# Altium footprint library ubloxLib.PcbLib: 65 footprints (part 4 of 5)
Each footprint in its own frame and in the unit in brackets; x right, y up, seen from the top. Pads: shape width x height; smd on the part's side, far side on the other; paste and mask are expansions set on the pad; w line width, h text height; cw(c..) or ccw(c..) is an arc to the next point about the centre after c.
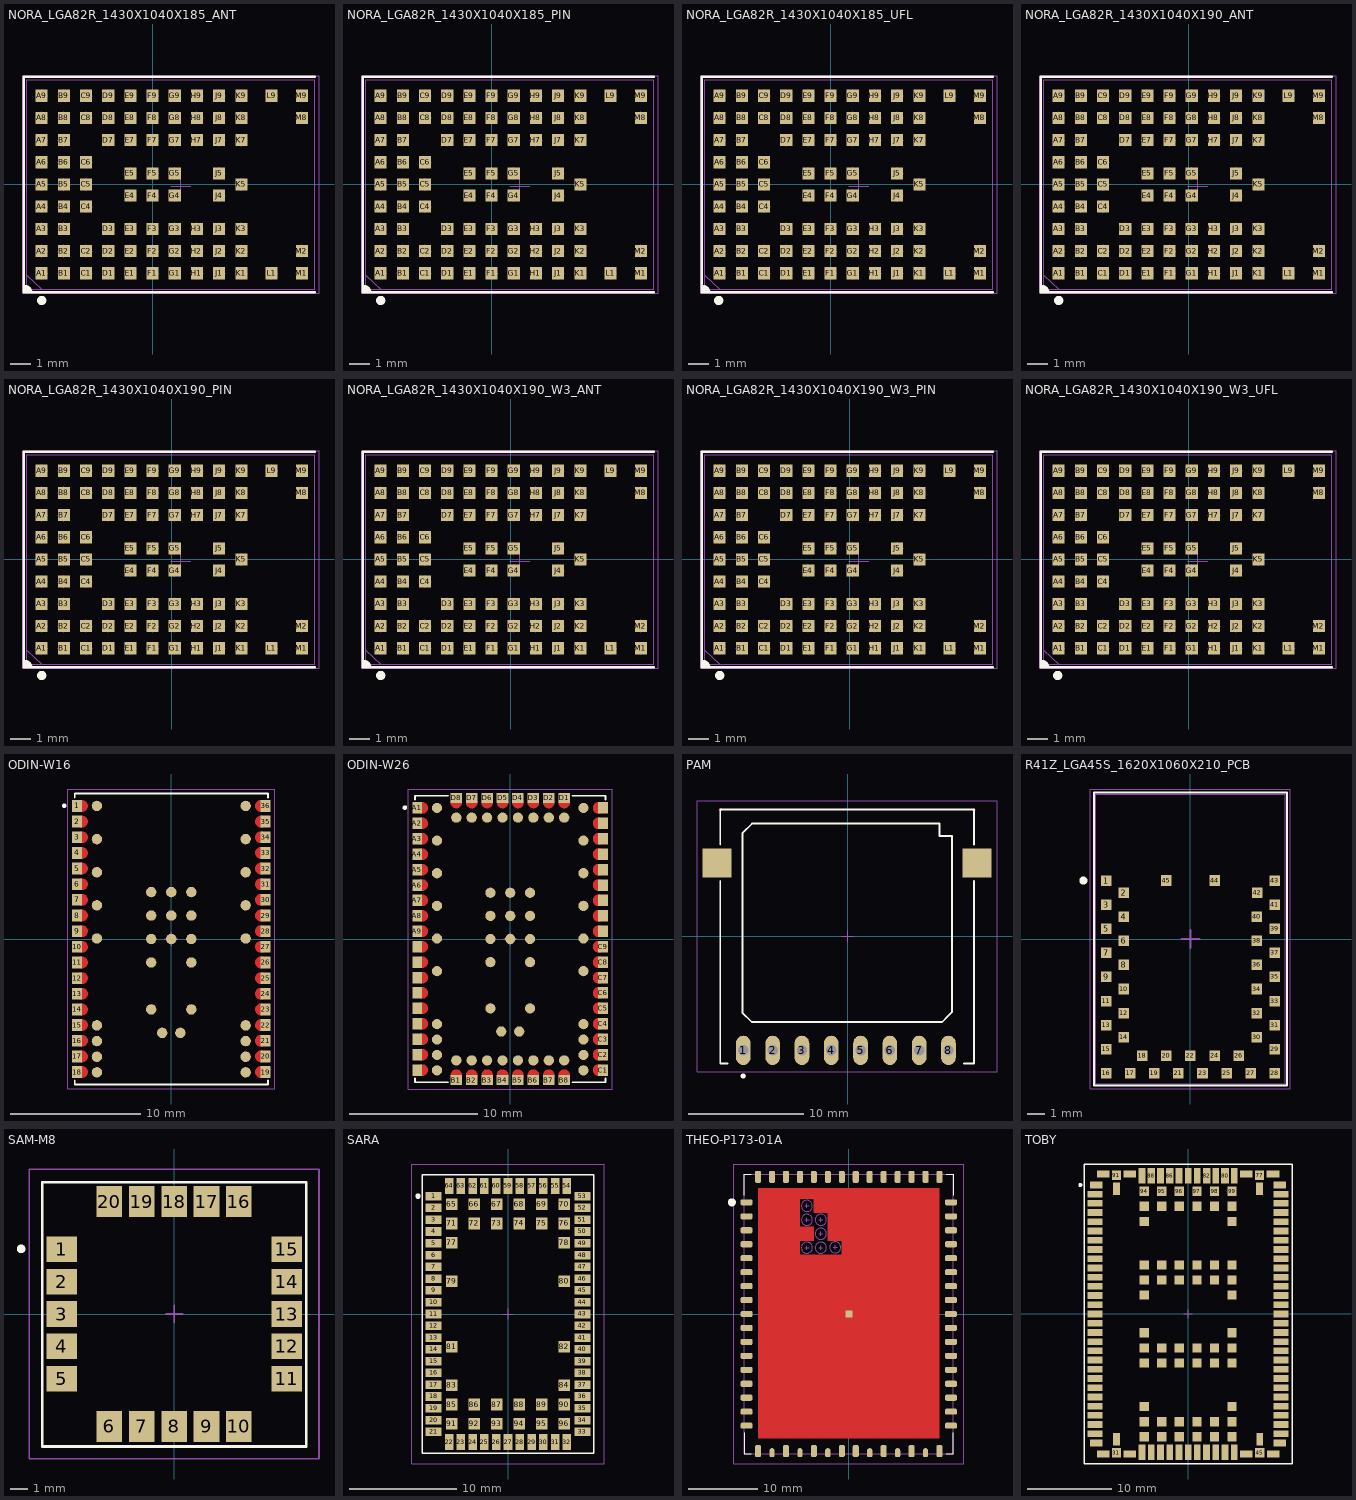
[diagram p3: the footprints below, top view; thin cyan lines are the x and y axes]

## NORA_LGA82R_1430X1040X185_ANT [mm] "NORA LGA, 82pin ,1.1mm Pitch, 14.3mm x 10.4mm, for NORA-B126"
height 1.8
pads (82):
  rect 0.6x0.6 smd: A1(-5.5,-4.4) A2(-5.5,-3.3) A3(-5.5,-2.2) A4(-5.5,-1.1) A5(-5.5,0) A6(-5.5,1.1) A7(-5.5,2.2) A8(-5.5,3.3) A9(-5.5,4.4) B1(-4.4,-4.4) B2(-4.4,-3.3) B3(-4.4,-2.2) B4(-4.4,-1.1) B5(-4.4,0) B6(-4.4,1.1) B7(-4.4,2.2) B8(-4.4,3.3) B9(-4.4,4.4) C1(-3.3,-4.4) C2(-3.3,-3.3) C4(-3.3,-1.1) C5(-3.3,0) C6(-3.3,1.1) C8(-3.3,3.3) C9(-3.3,4.4) D1(-2.2,-4.4) D2(-2.2,-3.3) D3(-2.2,-2.2) D7(-2.2,2.2) D8(-2.2,3.3) D9(-2.2,4.4) E1(-1.1,-4.4) E2(-1.1,-3.3) E3(-1.1,-2.2) E4(-1.1,-0.55) E5(-1.1,0.55) E7(-1.1,2.2) E8(-1.1,3.3) E9(-1.1,4.4) F1(0,-4.4) F2(0,-3.3) F3(0,-2.2) F4(0,-0.55) F5(0,0.55) F7(0,2.2) F8(0,3.3) F9(0,4.4) G1(1.1,-4.4) G2(1.1,-3.3) G3(1.1,-2.2) G4(1.1,-0.55) G5(1.1,0.55) G7(1.1,2.2) G8(1.1,3.3) G9(1.1,4.4) H1(2.2,-4.4) H2(2.2,-3.3) H3(2.2,-2.2) H7(2.2,2.2) H8(2.2,3.3) H9(2.2,4.4) J1(3.3,-4.4) J2(3.3,-3.3) J3(3.3,-2.2) J4(3.3,-0.55) J5(3.3,0.55) J7(3.3,2.2) J8(3.3,3.3) J9(3.3,4.4) K1(4.4,-4.4) K2(4.4,-3.3) K3(4.4,-2.2) K5(4.4,0) K7(4.4,2.2) K8(4.4,3.3) K9(4.4,4.4) L1(5.9,-4.4) L9(5.9,4.4) M1(7.4,-4.4) M2(7.4,-3.3) M8(7.4,3.3) M9(7.4,4.4)
Top Overlay:
  circle w0.254: c-5.5,-5.75 r0.1
  lines w0.127: 8.05,-5.35 -6.4,-5.35 -6.4,5.35 8.05,5.35
  lines w0.128: -6.343,-5.194 -6.193,-5.344 ; -6.3,-5.15 cw(c-6.3,-5.3) -6.15,-5.3 ; -6.3,-5.05 cw(c-6.325,-5.349) -6.025,-5.349
Mechanical 11:
  text ".Designator" at -1.075,-0.775 h1.5
Mechanical 13:
  lines w0.05: -6.25,-4.5 -5.5,-5.2 ; -6.25,-5.2 -6.25,5.2 8.05,5.2 8.05,-5.2 -6.25,-5.2
Mechanical 14:
  drawing of 328 lines, arcs and shapes, not listed
Mechanical 15:
  lines w0.05: 0.9,-0.1 1.9,-0.1 ; 1.4,-0.6 1.4,0.4 ; -6.45,-5.4 8.25,-5.4 8.25,5.4 -6.45,5.4 -6.45,-5.4
Mechanical 16:
  drawing of 492 lines, arcs and shapes, not listed
Multi-Layer:
  pour cut-out: 7.1,-4.1 7.1,-3.001 7.9,-2.998 7.9,-5.225 8.25,-5.225 8.25,5.325 7.9,5.325 7.9,3 7.1,3 7.1,4.1 4.7,4.1 4.7,-4.1
3D body "NORA-B126.step": height 1.85, standoff -0.01, extent -6.25,-5.2 8.05,5.2

## NORA_LGA82R_1430X1040X185_PIN [mm] "NORA LGA, 82pin ,1.1mm Pitch, 14.3mm x 10.4mm, for NORA-B121"
height 1.8
pads (82):
  rect 0.6x0.6 smd: A1(-5.5,-4.4) A2(-5.5,-3.3) A3(-5.5,-2.2) A4(-5.5,-1.1) A5(-5.5,0) A6(-5.5,1.1) A7(-5.5,2.2) A8(-5.5,3.3) A9(-5.5,4.4) B1(-4.4,-4.4) B2(-4.4,-3.3) B3(-4.4,-2.2) B4(-4.4,-1.1) B5(-4.4,0) B6(-4.4,1.1) B7(-4.4,2.2) B8(-4.4,3.3) B9(-4.4,4.4) C1(-3.3,-4.4) C2(-3.3,-3.3) C4(-3.3,-1.1) C5(-3.3,0) C6(-3.3,1.1) C8(-3.3,3.3) C9(-3.3,4.4) D1(-2.2,-4.4) D2(-2.2,-3.3) D3(-2.2,-2.2) D7(-2.2,2.2) D8(-2.2,3.3) D9(-2.2,4.4) E1(-1.1,-4.4) E2(-1.1,-3.3) E3(-1.1,-2.2) E4(-1.1,-0.55) E5(-1.1,0.55) E7(-1.1,2.2) E8(-1.1,3.3) E9(-1.1,4.4) F1(0,-4.4) F2(0,-3.3) F3(0,-2.2) F4(0,-0.55) F5(0,0.55) F7(0,2.2) F8(0,3.3) F9(0,4.4) G1(1.1,-4.4) G2(1.1,-3.3) G3(1.1,-2.2) G4(1.1,-0.55) G5(1.1,0.55) G7(1.1,2.2) G8(1.1,3.3) G9(1.1,4.4) H1(2.2,-4.4) H2(2.2,-3.3) H3(2.2,-2.2) H7(2.2,2.2) H8(2.2,3.3) H9(2.2,4.4) J1(3.3,-4.4) J2(3.3,-3.3) J3(3.3,-2.2) J4(3.3,-0.55) J5(3.3,0.55) J7(3.3,2.2) J8(3.3,3.3) J9(3.3,4.4) K1(4.4,-4.4) K2(4.4,-3.3) K3(4.4,-2.2) K5(4.4,0) K7(4.4,2.2) K8(4.4,3.3) K9(4.4,4.4) L1(5.9,-4.4) L9(5.9,4.4) M1(7.4,-4.4) M2(7.4,-3.3) M8(7.4,3.3) M9(7.4,4.4)
Top Overlay:
  circle w0.254: c-5.5,-5.75 r0.1
  lines w0.127: 8.05,-5.35 -6.4,-5.35 -6.4,5.35 8.05,5.35
  lines w0.128: -6.343,-5.194 -6.193,-5.344 ; -6.3,-5.15 cw(c-6.3,-5.3) -6.15,-5.3 ; -6.3,-5.05 cw(c-6.325,-5.349) -6.025,-5.349
Mechanical 11:
  text ".Designator" at -1.075,-0.775 h1.5
Mechanical 13:
  lines w0.05: -6.25,-4.5 -5.5,-5.2 ; -6.25,-5.2 8.05,-5.2 8.05,5.2 -6.25,5.2 -6.25,-5.2
Mechanical 14:
  drawing of 328 lines, arcs and shapes, not listed
Mechanical 15:
  lines w0.05: 0.9,-0.1 1.9,-0.1 ; 1.4,-0.6 1.4,0.4 ; -6.45,-5.4 -6.45,5.4 8.25,5.4 8.25,-5.4 -6.45,-5.4
Mechanical 16:
  drawing of 492 lines, arcs and shapes, not listed
Multi-Layer:
  pour cut-out: 7.1,-4.1 7.1,-3.001 7.9,-2.998 7.9,-5.225 8.25,-5.225 8.25,5.325 7.9,5.325 7.9,3 7.1,3 7.1,4.1 4.7,4.1 4.7,-4.1
3D body "NORA-B121.step": height 1.85, standoff -0.01, extent -6.25,-5.2 8.05,5.2

## NORA_LGA82R_1430X1040X185_UFL [mm] "NORA LGA, 82pin ,1.1mm Pitch, 14.3mm x 10.4mm, for NORA-B120"
height 1.8
pads (82):
  rect 0.6x0.6 smd: A1(-5.5,-4.4) A2(-5.5,-3.3) A3(-5.5,-2.2) A4(-5.5,-1.1) A5(-5.5,0) A6(-5.5,1.1) A7(-5.5,2.2) A8(-5.5,3.3) A9(-5.5,4.4) B1(-4.4,-4.4) B2(-4.4,-3.3) B3(-4.4,-2.2) B4(-4.4,-1.1) B5(-4.4,0) B6(-4.4,1.1) B7(-4.4,2.2) B8(-4.4,3.3) B9(-4.4,4.4) C1(-3.3,-4.4) C2(-3.3,-3.3) C4(-3.3,-1.1) C5(-3.3,0) C6(-3.3,1.1) C8(-3.3,3.3) C9(-3.3,4.4) D1(-2.2,-4.4) D2(-2.2,-3.3) D3(-2.2,-2.2) D7(-2.2,2.2) D8(-2.2,3.3) D9(-2.2,4.4) E1(-1.1,-4.4) E2(-1.1,-3.3) E3(-1.1,-2.2) E4(-1.1,-0.55) E5(-1.1,0.55) E7(-1.1,2.2) E8(-1.1,3.3) E9(-1.1,4.4) F1(0,-4.4) F2(0,-3.3) F3(0,-2.2) F4(0,-0.55) F5(0,0.55) F7(0,2.2) F8(0,3.3) F9(0,4.4) G1(1.1,-4.4) G2(1.1,-3.3) G3(1.1,-2.2) G4(1.1,-0.55) G5(1.1,0.55) G7(1.1,2.2) G8(1.1,3.3) G9(1.1,4.4) H1(2.2,-4.4) H2(2.2,-3.3) H3(2.2,-2.2) H7(2.2,2.2) H8(2.2,3.3) H9(2.2,4.4) J1(3.3,-4.4) J2(3.3,-3.3) J3(3.3,-2.2) J4(3.3,-0.55) J5(3.3,0.55) J7(3.3,2.2) J8(3.3,3.3) J9(3.3,4.4) K1(4.4,-4.4) K2(4.4,-3.3) K3(4.4,-2.2) K5(4.4,0) K7(4.4,2.2) K8(4.4,3.3) K9(4.4,4.4) L1(5.9,-4.4) L9(5.9,4.4) M1(7.4,-4.4) M2(7.4,-3.3) M8(7.4,3.3) M9(7.4,4.4)
Top Overlay:
  circle w0.254: c-5.55,-5.75 r0.1
  lines w0.127: 8.05,-5.35 -6.4,-5.35 -6.4,5.35 8.05,5.35
  lines w0.128: -6.343,-5.194 -6.193,-5.344 ; -6.3,-5.15 cw(c-6.3,-5.3) -6.15,-5.3 ; -6.3,-5.05 cw(c-6.325,-5.349) -6.025,-5.349
Mechanical 11:
  text ".Designator" at -1.075,-0.775 h1.5
Mechanical 13:
  lines w0.05: -6.25,-4.5 -5.5,-5.2 ; -6.25,-5.2 8.05,-5.2 8.05,5.2 -6.25,5.2 -6.25,-5.2
Mechanical 14:
  drawing of 328 lines, arcs and shapes, not listed
Mechanical 15:
  lines w0.05: 0.9,-0.1 1.9,-0.1 ; 1.4,-0.6 1.4,0.4 ; -6.45,-5.4 -6.45,5.4 8.25,5.4 8.25,-5.4 -6.45,-5.4
Mechanical 16:
  drawing of 492 lines, arcs and shapes, not listed
Multi-Layer:
  pour cut-out: 7.1,-4.1 7.1,-3.001 7.9,-2.998 7.9,-5.225 8.25,-5.225 8.25,5.325 7.9,5.325 7.9,3 7.1,3 7.1,4.1 4.7,4.1 4.7,-4.1
3D body "NORA-B120.step": height 1.85, standoff -0.01, extent -6.25,-5.2 8.05,5.2

## NORA_LGA82R_1430X1040X190_ANT [mm] "NORA LGA, 82pin ,1.1mm Pitch, 14.3mm x 10.4mm x 1.9mm"
height 1.9
pads (82):
  rect 0.6x0.6 smd: A1(-6.45,-4.4) A2(-6.45,-3.3) A3(-6.45,-2.2) A4(-6.45,-1.1) A5(-6.45,0) A6(-6.45,1.1) A7(-6.45,2.2) A8(-6.45,3.3) A9(-6.45,4.4) B1(-5.35,-4.4) B2(-5.35,-3.3) B3(-5.35,-2.2) B4(-5.35,-1.1) B5(-5.35,0) B6(-5.35,1.1) B7(-5.35,2.2) B8(-5.35,3.3) B9(-5.35,4.4) C1(-4.25,-4.4) C2(-4.25,-3.3) C4(-4.25,-1.1) C5(-4.25,0) C6(-4.25,1.1) C8(-4.25,3.3) C9(-4.25,4.4) D1(-3.15,-4.4) D2(-3.15,-3.3) D3(-3.15,-2.2) D7(-3.15,2.2) D8(-3.15,3.3) D9(-3.15,4.4) E1(-2.05,-4.4) E2(-2.05,-3.3) E3(-2.05,-2.2) E4(-2.05,-0.55) E5(-2.05,0.55) E7(-2.05,2.2) E8(-2.05,3.3) E9(-2.05,4.4) F1(-0.95,-4.4) F2(-0.95,-3.3) F3(-0.95,-2.2) F4(-0.95,-0.55) F5(-0.95,0.55) F7(-0.95,2.2) F8(-0.95,3.3) F9(-0.95,4.4) G1(0.15,-4.4) G2(0.15,-3.3) G3(0.15,-2.2) G4(0.15,-0.55) G5(0.15,0.55) G7(0.15,2.2) G8(0.15,3.3) G9(0.15,4.4) H1(1.25,-4.4) H2(1.25,-3.3) H3(1.25,-2.2) H7(1.25,2.2) H8(1.25,3.3) H9(1.25,4.4) J1(2.35,-4.4) J2(2.35,-3.3) J3(2.35,-2.2) J4(2.35,-0.55) J5(2.35,0.55) J7(2.35,2.2) J8(2.35,3.3) J9(2.35,4.4) K1(3.45,-4.4) K2(3.45,-3.3) K3(3.45,-2.2) K5(3.45,0) K7(3.45,2.2) K8(3.45,3.3) K9(3.45,4.4) L1(4.95,-4.4) L9(4.95,4.4) M1(6.45,-4.4) M2(6.45,-3.3) M8(6.45,3.3) M9(6.45,4.4)
Top Overlay:
  circle w0.254: c-6.45,-5.75 r0.1
  lines w0.127: 7.1,-5.35 -7.35,-5.35 -7.35,5.35 7.1,5.35
  lines w0.128: -7.293,-5.194 -7.143,-5.344 ; -7.25,-5.15 cw(c-7.25,-5.3) -7.1,-5.3 ; -7.25,-5.05 cw(c-7.275,-5.349) -6.975,-5.349
Mechanical 11:
  text ".Designator" at -2.025,-0.775 h1.5
Mechanical 13:
  lines w0.05: -7.2,-4.5 -6.45,-5.2 ; -7.2,-5.2 -7.2,5.2 7.1,5.2 7.1,-5.2 -7.2,-5.2
Mechanical 14:
  drawing of 328 lines, arcs and shapes, not listed
Mechanical 15:
  lines w0.05: -0.05,-0.1 0.95,-0.1 ; 0.45,-0.6 0.45,0.4 ; -7.4,-5.4 7.3,-5.4 7.3,5.4 -7.4,5.4 -7.4,-5.4
Mechanical 16:
  drawing of 492 lines, arcs and shapes, not listed
Multi-Layer:
  pour cut-out: 6.15,-4.1 6.15,-3.001 6.95,-2.998 6.95,-5.225 7.3,-5.225 7.3,5.325 6.95,5.325 6.95,3 6.15,3 6.15,4.1 3.75,4.1 3.75,-4.1
3D body "NORA-W106.step": height 1.94, standoff 0, extent -7.2,-5.2 7.1,5.2

## NORA_LGA82R_1430X1040X190_PIN [mm] "NORA LGA, 82pin ,1.1mm Pitch, 14.3mm x 10.4mm x 1.9mm"
height 1.9
pads (82):
  rect 0.6x0.6 smd: A1(-6.45,-4.4) A2(-6.45,-3.3) A3(-6.45,-2.2) A4(-6.45,-1.1) A5(-6.45,0) A6(-6.45,1.1) A7(-6.45,2.2) A8(-6.45,3.3) A9(-6.45,4.4) B1(-5.35,-4.4) B2(-5.35,-3.3) B3(-5.35,-2.2) B4(-5.35,-1.1) B5(-5.35,0) B6(-5.35,1.1) B7(-5.35,2.2) B8(-5.35,3.3) B9(-5.35,4.4) C1(-4.25,-4.4) C2(-4.25,-3.3) C4(-4.25,-1.1) C5(-4.25,0) C6(-4.25,1.1) C8(-4.25,3.3) C9(-4.25,4.4) D1(-3.15,-4.4) D2(-3.15,-3.3) D3(-3.15,-2.2) D7(-3.15,2.2) D8(-3.15,3.3) D9(-3.15,4.4) E1(-2.05,-4.4) E2(-2.05,-3.3) E3(-2.05,-2.2) E4(-2.05,-0.55) E5(-2.05,0.55) E7(-2.05,2.2) E8(-2.05,3.3) E9(-2.05,4.4) F1(-0.95,-4.4) F2(-0.95,-3.3) F3(-0.95,-2.2) F4(-0.95,-0.55) F5(-0.95,0.55) F7(-0.95,2.2) F8(-0.95,3.3) F9(-0.95,4.4) G1(0.15,-4.4) G2(0.15,-3.3) G3(0.15,-2.2) G4(0.15,-0.55) G5(0.15,0.55) G7(0.15,2.2) G8(0.15,3.3) G9(0.15,4.4) H1(1.25,-4.4) H2(1.25,-3.3) H3(1.25,-2.2) H7(1.25,2.2) H8(1.25,3.3) H9(1.25,4.4) J1(2.35,-4.4) J2(2.35,-3.3) J3(2.35,-2.2) J4(2.35,-0.55) J5(2.35,0.55) J7(2.35,2.2) J8(2.35,3.3) J9(2.35,4.4) K1(3.45,-4.4) K2(3.45,-3.3) K3(3.45,-2.2) K5(3.45,0) K7(3.45,2.2) K8(3.45,3.3) K9(3.45,4.4) L1(4.95,-4.4) L9(4.95,4.4) M1(6.45,-4.4) M2(6.45,-3.3) M8(6.45,3.3) M9(6.45,4.4)
Top Overlay:
  circle w0.254: c-6.45,-5.75 r0.1
  lines w0.127: 7.1,-5.35 -7.35,-5.35 -7.35,5.35 7.1,5.35
  lines w0.128: -7.293,-5.194 -7.143,-5.344 ; -7.25,-5.15 cw(c-7.25,-5.3) -7.1,-5.3 ; -7.25,-5.05 cw(c-7.275,-5.349) -6.975,-5.349
Mechanical 11:
  text ".Designator" at -2.025,-0.775 h1.5
Mechanical 13:
  lines w0.05: -7.2,-4.5 -6.45,-5.2 ; -7.2,-5.2 -7.2,5.2 7.1,5.2 7.1,-5.2 -7.2,-5.2
Mechanical 14:
  drawing of 328 lines, arcs and shapes, not listed
Mechanical 15:
  lines w0.05: -0.05,-0.1 0.95,-0.1 ; 0.45,-0.6 0.45,0.4 ; -7.4,-5.4 7.3,-5.4 7.3,5.4 -7.4,5.4 -7.4,-5.4
Mechanical 16:
  drawing of 492 lines, arcs and shapes, not listed
Multi-Layer:
  pour cut-out: 6.15,-4.1 6.15,-3.001 6.95,-2.998 6.95,-5.225 7.3,-5.225 7.3,5.325 6.95,5.325 6.95,3 6.15,3 6.15,4.1 3.75,4.1 3.75,-4.1
3D body "NORA-W101.step": height 1.94, standoff 0, extent -7.2,-5.2 7.1,5.2

## NORA_LGA82R_1430X1040X190_W3_ANT [mm] "NORA LGA, 82pin ,1.1mm Pitch, 14.3mm x 10.4mm"
height 1.8
pads (82):
  rect 0.6x0.6 smd: A1(-6.45,-4.4) A2(-6.45,-3.3) A3(-6.45,-2.2) A4(-6.45,-1.1) A5(-6.45,0) A6(-6.45,1.1) A7(-6.45,2.2) A8(-6.45,3.3) A9(-6.45,4.4) B1(-5.35,-4.4) B2(-5.35,-3.3) B3(-5.35,-2.2) B4(-5.35,-1.1) B5(-5.35,0) B6(-5.35,1.1) B7(-5.35,2.2) B8(-5.35,3.3) B9(-5.35,4.4) C1(-4.25,-4.4) C2(-4.25,-3.3) C4(-4.25,-1.1) C5(-4.25,0) C6(-4.25,1.1) C8(-4.25,3.3) C9(-4.25,4.4) D1(-3.15,-4.4) D2(-3.15,-3.3) D3(-3.15,-2.2) D7(-3.15,2.2) D8(-3.15,3.3) D9(-3.15,4.4) E1(-2.05,-4.4) E2(-2.05,-3.3) E3(-2.05,-2.2) E4(-2.05,-0.55) E5(-2.05,0.55) E7(-2.05,2.2) E8(-2.05,3.3) E9(-2.05,4.4) F1(-0.95,-4.4) F2(-0.95,-3.3) F3(-0.95,-2.2) F4(-0.95,-0.55) F5(-0.95,0.55) F7(-0.95,2.2) F8(-0.95,3.3) F9(-0.95,4.4) G1(0.15,-4.4) G2(0.15,-3.3) G3(0.15,-2.2) G4(0.15,-0.55) G5(0.15,0.55) G7(0.15,2.2) G8(0.15,3.3) G9(0.15,4.4) H1(1.25,-4.4) H2(1.25,-3.3) H3(1.25,-2.2) H7(1.25,2.2) H8(1.25,3.3) H9(1.25,4.4) J1(2.35,-4.4) J2(2.35,-3.3) J3(2.35,-2.2) J4(2.35,-0.55) J5(2.35,0.55) J7(2.35,2.2) J8(2.35,3.3) J9(2.35,4.4) K1(3.45,-4.4) K2(3.45,-3.3) K3(3.45,-2.2) K5(3.45,0) K7(3.45,2.2) K8(3.45,3.3) K9(3.45,4.4) L1(4.95,-4.4) L9(4.95,4.4) M1(6.45,-4.4) M2(6.45,-3.3) M8(6.45,3.3) M9(6.45,4.4)
Top Overlay:
  circle w0.254: c-6.45,-5.75 r0.1
  lines w0.127: 7.1,-5.35 -7.35,-5.35 -7.35,5.35 7.1,5.35
  lines w0.128: -7.293,-5.194 -7.143,-5.344 ; -7.25,-5.15 cw(c-7.25,-5.3) -7.1,-5.3 ; -7.25,-5.05 cw(c-7.275,-5.349) -6.975,-5.349
Mechanical 11:
  text ".Designator" at -2.025,-0.775 h1.5
Mechanical 13:
  lines w0.05: -7.2,-4.5 -6.45,-5.2 ; -7.2,-5.2 -7.2,5.2 7.1,5.2 7.1,-5.2 -7.2,-5.2
Mechanical 14:
  drawing of 328 lines, arcs and shapes, not listed
Mechanical 15:
  lines w0.05: -0.05,-0.1 0.95,-0.1 ; 0.45,-0.6 0.45,0.4 ; -7.4,-5.4 7.3,-5.4 7.3,5.4 -7.4,5.4 -7.4,-5.4
Mechanical 16:
  drawing of 492 lines, arcs and shapes, not listed
Multi-Layer:
  pour cut-out: 6.15,-4.1 6.15,-3.001 6.95,-2.998 6.95,-5.225 7.3,-5.225 7.3,5.325 6.95,5.325 6.95,3 6.15,3 6.15,4.1 3.75,4.1 3.75,-4.1
3D body "NORA-W306.step": height 1.83, standoff -0.03, extent -7.2,-5.2 7.1,5.2

## NORA_LGA82R_1430X1040X190_W3_PIN [mm] "NORA LGA, 82pin ,1.1mm Pitch, 14.3mm x 10.4mm"
height 1.8
pads (82):
  rect 0.6x0.6 smd: A1(-6.45,-4.4) A2(-6.45,-3.3) A3(-6.45,-2.2) A4(-6.45,-1.1) A5(-6.45,0) A6(-6.45,1.1) A7(-6.45,2.2) A8(-6.45,3.3) A9(-6.45,4.4) B1(-5.35,-4.4) B2(-5.35,-3.3) B3(-5.35,-2.2) B4(-5.35,-1.1) B5(-5.35,0) B6(-5.35,1.1) B7(-5.35,2.2) B8(-5.35,3.3) B9(-5.35,4.4) C1(-4.25,-4.4) C2(-4.25,-3.3) C4(-4.25,-1.1) C5(-4.25,0) C6(-4.25,1.1) C8(-4.25,3.3) C9(-4.25,4.4) D1(-3.15,-4.4) D2(-3.15,-3.3) D3(-3.15,-2.2) D7(-3.15,2.2) D8(-3.15,3.3) D9(-3.15,4.4) E1(-2.05,-4.4) E2(-2.05,-3.3) E3(-2.05,-2.2) E4(-2.05,-0.55) E5(-2.05,0.55) E7(-2.05,2.2) E8(-2.05,3.3) E9(-2.05,4.4) F1(-0.95,-4.4) F2(-0.95,-3.3) F3(-0.95,-2.2) F4(-0.95,-0.55) F5(-0.95,0.55) F7(-0.95,2.2) F8(-0.95,3.3) F9(-0.95,4.4) G1(0.15,-4.4) G2(0.15,-3.3) G3(0.15,-2.2) G4(0.15,-0.55) G5(0.15,0.55) G7(0.15,2.2) G8(0.15,3.3) G9(0.15,4.4) H1(1.25,-4.4) H2(1.25,-3.3) H3(1.25,-2.2) H7(1.25,2.2) H8(1.25,3.3) H9(1.25,4.4) J1(2.35,-4.4) J2(2.35,-3.3) J3(2.35,-2.2) J4(2.35,-0.55) J5(2.35,0.55) J7(2.35,2.2) J8(2.35,3.3) J9(2.35,4.4) K1(3.45,-4.4) K2(3.45,-3.3) K3(3.45,-2.2) K5(3.45,0) K7(3.45,2.2) K8(3.45,3.3) K9(3.45,4.4) L1(4.95,-4.4) L9(4.95,4.4) M1(6.45,-4.4) M2(6.45,-3.3) M8(6.45,3.3) M9(6.45,4.4)
Top Overlay:
  circle w0.254: c-6.45,-5.75 r0.1
  lines w0.127: 7.1,-5.35 -7.35,-5.35 -7.35,5.35 7.1,5.35
  lines w0.128: -7.293,-5.194 -7.143,-5.344 ; -7.25,-5.15 cw(c-7.25,-5.3) -7.1,-5.3 ; -7.25,-5.05 cw(c-7.275,-5.349) -6.975,-5.349
Mechanical 11:
  text ".Designator" at -2.025,-0.775 h1.5
Mechanical 13:
  lines w0.05: -7.2,-4.5 -6.45,-5.2 ; -7.2,-5.2 7.1,-5.2 7.1,5.2 -7.2,5.2 -7.2,-5.2
Mechanical 14:
  drawing of 328 lines, arcs and shapes, not listed
Mechanical 15:
  lines w0.05: -0.05,-0.1 0.95,-0.1 ; 0.45,-0.6 0.45,0.4 ; -7.4,-5.4 -7.4,5.4 7.3,5.4 7.3,-5.4 -7.4,-5.4
Mechanical 16:
  drawing of 492 lines, arcs and shapes, not listed
Multi-Layer:
  pour cut-out: 6.15,-4.1 6.15,-3.001 6.95,-2.998 6.95,-5.225 7.3,-5.225 7.3,5.325 6.95,5.325 6.95,3 6.15,3 6.15,4.1 3.75,4.1 3.75,-4.1
3D body "NORA-W301.step": height 1.83, standoff -0.03, extent -7.2,-5.2 7.1,5.2

## NORA_LGA82R_1430X1040X190_W3_UFL [mm] "NORA LGA, 82pin ,1.1mm Pitch, 14.3mm x 10.4mm"
height 1.8
pads (82):
  rect 0.6x0.6 smd: A1(-6.45,-4.4) A2(-6.45,-3.3) A3(-6.45,-2.2) A4(-6.45,-1.1) A5(-6.45,0) A6(-6.45,1.1) A7(-6.45,2.2) A8(-6.45,3.3) A9(-6.45,4.4) B1(-5.35,-4.4) B2(-5.35,-3.3) B3(-5.35,-2.2) B4(-5.35,-1.1) B5(-5.35,0) B6(-5.35,1.1) B7(-5.35,2.2) B8(-5.35,3.3) B9(-5.35,4.4) C1(-4.25,-4.4) C2(-4.25,-3.3) C4(-4.25,-1.1) C5(-4.25,0) C6(-4.25,1.1) C8(-4.25,3.3) C9(-4.25,4.4) D1(-3.15,-4.4) D2(-3.15,-3.3) D3(-3.15,-2.2) D7(-3.15,2.2) D8(-3.15,3.3) D9(-3.15,4.4) E1(-2.05,-4.4) E2(-2.05,-3.3) E3(-2.05,-2.2) E4(-2.05,-0.55) E5(-2.05,0.55) E7(-2.05,2.2) E8(-2.05,3.3) E9(-2.05,4.4) F1(-0.95,-4.4) F2(-0.95,-3.3) F3(-0.95,-2.2) F4(-0.95,-0.55) F5(-0.95,0.55) F7(-0.95,2.2) F8(-0.95,3.3) F9(-0.95,4.4) G1(0.15,-4.4) G2(0.15,-3.3) G3(0.15,-2.2) G4(0.15,-0.55) G5(0.15,0.55) G7(0.15,2.2) G8(0.15,3.3) G9(0.15,4.4) H1(1.25,-4.4) H2(1.25,-3.3) H3(1.25,-2.2) H7(1.25,2.2) H8(1.25,3.3) H9(1.25,4.4) J1(2.35,-4.4) J2(2.35,-3.3) J3(2.35,-2.2) J4(2.35,-0.55) J5(2.35,0.55) J7(2.35,2.2) J8(2.35,3.3) J9(2.35,4.4) K1(3.45,-4.4) K2(3.45,-3.3) K3(3.45,-2.2) K5(3.45,0) K7(3.45,2.2) K8(3.45,3.3) K9(3.45,4.4) L1(4.95,-4.4) L9(4.95,4.4) M1(6.45,-4.4) M2(6.45,-3.3) M8(6.45,3.3) M9(6.45,4.4)
Top Overlay:
  circle w0.254: c-6.5,-5.75 r0.1
  lines w0.127: 7.1,-5.35 -7.35,-5.35 -7.35,5.35 7.1,5.35
  lines w0.128: -7.293,-5.194 -7.143,-5.344 ; -7.25,-5.15 cw(c-7.25,-5.3) -7.1,-5.3 ; -7.25,-5.05 cw(c-7.275,-5.349) -6.975,-5.349
Mechanical 11:
  text ".Designator" at -2.025,-0.775 h1.5
Mechanical 13:
  lines w0.05: -7.2,-4.5 -6.45,-5.2 ; -7.2,-5.2 7.1,-5.2 7.1,5.2 -7.2,5.2 -7.2,-5.2
Mechanical 14:
  drawing of 328 lines, arcs and shapes, not listed
Mechanical 15:
  lines w0.05: -0.05,-0.1 0.95,-0.1 ; 0.45,-0.6 0.45,0.4 ; -7.4,-5.4 -7.4,5.4 7.3,5.4 7.3,-5.4 -7.4,-5.4
Mechanical 16:
  drawing of 492 lines, arcs and shapes, not listed
Multi-Layer:
  pour cut-out: 6.15,-4.1 6.15,-3.001 6.95,-2.998 6.95,-5.225 7.3,-5.225 7.3,5.325 6.95,5.325 6.95,3 6.15,3 6.15,4.1 3.75,4.1 3.75,-4.1
3D body "NORA-W300.step": height 1.83, standoff -0.03, extent -7.2,-5.2 7.1,5.2

## ODIN-W16 [mm] "ODIN-W16 WiFi/BT module"
pads (69):
  rect 0.75x0.9 smd mask+0.05: 1(-7.225,10.213) 2(-7.225,9.013) 3(-7.225,7.813) 4(-7.225,6.613) 5(-7.225,5.413) 6(-7.225,4.213) 7(-7.225,3.013) 8(-7.225,1.813) 9(-7.225,0.613) 10(-7.225,-0.587) 11(-7.225,-1.787) 12(-7.225,-2.987) 13(-7.225,-4.187) 14(-7.225,-5.388) 15(-7.225,-6.588) 16(-7.225,-7.788) 17(-7.225,-8.988) 18(-7.225,-10.188) 19(7.225,-10.188) 20(7.225,-8.988) 21(7.225,-7.788) 22(7.225,-6.588) 23(7.225,-5.388) 24(7.225,-4.187) 25(7.225,-2.987) 26(7.225,-1.787) 27(7.225,-0.587) 28(7.225,0.613) 29(7.225,1.813) 30(7.225,3.013) 31(7.225,4.213) 32(7.225,5.413) 33(7.225,6.613) 34(7.225,7.813) 35(7.225,9.013) 36(7.225,10.213)
  round 0.8 smd mask+0.05: GND(-1.54,-5.387) GND(-1.54,-1.787) GND(-1.54,0.013) GND(-1.54,1.813) GND(-1.54,3.613) GND(-0.7,-7.187) GND(0,0.013) GND(0,1.813) GND(0,3.613) GND(0.7,-7.187) GND(1.54,-5.387) GND(1.54,-1.787) GND(1.54,0.013) GND(1.54,1.813) GND(1.54,3.613) GND(5.7,-10.212) GND(5.7,-9.012) GND(5.7,-7.812) GND(5.7,-6.612) NC1(-5.7,-10.212) NC2(-5.7,-9.012) NC3(-5.7,-7.812) NC4(-5.7,-6.612) TP1(-5.7,0.053) TP2(5.7,0.053) TP3(-5.7,2.593) TP4(5.7,2.593) TP5(-5.7,5.133) TP6(5.7,5.133) TP7(-5.7,7.673) TP8(5.7,7.673) TP9(-5.7,10.213) TP10(5.7,10.213)
Top Layer:
  circle w0.45: c-6.85,10.213 r0.225
  circle w0.45: c-6.85,9.013 r0.225
  circle w0.45: c-6.85,7.813 r0.225
  circle w0.45: c-6.85,6.613 r0.225
  circle w0.45: c-6.85,5.413 r0.225
  circle w0.45: c-6.85,4.213 r0.225
  circle w0.45: c-6.85,3.013 r0.225
  circle w0.45: c-6.85,1.813 r0.225
  circle w0.45: c-6.85,0.613 r0.225
  circle w0.45: c-6.85,-0.587 r0.225
  circle w0.45: c-6.85,-1.787 r0.225
  circle w0.45: c-6.85,-2.987 r0.225
  circle w0.45: c-6.85,-4.187 r0.225
  circle w0.45: c-6.85,-5.388 r0.225
  circle w0.45: c-6.85,-6.587 r0.225
  circle w0.45: c-6.85,-7.788 r0.225
  circle w0.45: c-6.85,-8.988 r0.225
  circle w0.45: c-6.85,-10.187 r0.225
  circle w0.45: c6.875,-10.188 r0.225
  circle w0.45: c6.875,-8.988 r0.225
  circle w0.45: c6.875,-7.788 r0.225
  circle w0.45: c6.875,-6.588 r0.225
  circle w0.45: c6.875,-5.388 r0.225
  circle w0.45: c6.875,-4.188 r0.225
  circle w0.45: c6.875,-2.988 r0.225
  circle w0.45: c6.875,-0.588 r0.225
  circle w0.45: c6.875,0.612 r0.225
  circle w0.45: c6.875,1.812 r0.225
  circle w0.45: c6.875,3.012 r0.225
  circle w0.45: c6.875,10.212 r0.225
  circle w0.45: c6.875,9.012 r0.225
  circle w0.45: c6.875,7.812 r0.225
  circle w0.45: c6.875,4.212 r0.225
  circle w0.45: c6.875,5.412 r0.225
  circle w0.45: c6.875,6.612 r0.225
  circle w0.45: c6.875,-1.787 r0.225
Top Overlay:
  lines w0.15: -7.4,-10.837 -7.4,-11.137 7.4,-11.137 7.4,-10.837 ; -7.4,10.863 -7.4,11.163 7.4,11.163 7.4,10.863
  lines w0.2: -8.13,10.246 ccw(c-8.2,10.225) -8.127,10.218
Mechanical 15:
  lines w0.05: -7.925,-11.487 -7.925,11.513 7.925,11.513 7.925,-11.487 -7.925,-11.487
  lines w0.1: -0.5,0 0,0 0.5,0 ; 0,-0.5 0,0.5
  text ".Designator" at 0.1,0.433 h1
3D body "ODIN-W160 3D-model.stp": height 3.1, standoff 0.18, extent -7.4,-11.138 7.4,11.162

## ODIN-W26 [mm] "ODIN-W262 WiFi/BT  module"
pads (103):
  rect 0.75x0.9 smd mask+0.05: A1(-7.225,10.2) A2(-7.225,9) A3(-7.225,7.8) A4(-7.225,6.6) A5(-7.225,5.4) A6(-7.225,4.2) A7(-7.225,3) A8(-7.225,1.8) A9(-7.225,0.6) A10(-7.225,-0.6) A11(-7.225,-1.8) A12(-7.225,-3) A13(-7.225,-4.2) A14(-7.225,-5.4) A15(-7.225,-6.6) A16(-7.225,-7.8) A17(-7.225,-9) A18(-7.225,-10.2) C1(7.225,-10.2) C2(7.225,-9) C3(7.225,-7.8) C4(7.225,-6.6) C5(7.225,-5.4) C6(7.225,-4.2) C7(7.225,-3) C8(7.225,-1.8) C9(7.225,-0.6) C10(7.225,0.6) C11(7.225,1.8) C12(7.225,3) C13(7.225,4.2) C14(7.225,5.4) C15(7.225,6.6) C16(7.225,7.8) C17(7.225,9) C18(7.225,10.2)
  rect 0.9x0.75 smd mask+0.05: B1(-4.2,-10.975) B2(-3,-10.975) B3(-1.8,-10.975) B4(-0.6,-10.975) B5(0.6,-10.975) B6(1.8,-10.975) B7(3,-10.975) B8(4.2,-10.975) D1(4.2,10.975) D2(3,10.975) D3(1.8,10.975) D4(0.6,10.975) D5(-0.6,10.975) D6(-1.8,10.975) D7(-3,10.975) D8(-4.2,10.975)
  round 0.8 smd mask+0.05: GND(-5.7,-10.225) GND(-5.7,-9.025) GND(-5.7,-7.825) GND(-5.7,-6.625) GND(-4.2,-9.45) GND(-4.2,9.45) GND(-3,-9.45) GND(-3,9.45) GND(-1.8,-9.45) GND(-1.8,9.45) GND(-1.54,-5.4) GND(-1.54,-1.8) GND(-1.54,0) GND(-1.54,1.8) GND(-1.54,3.6) GND(-0.7,-7.2) GND(-0.6,-9.45) GND(-0.6,9.45) GND(0,0) GND(0,1.8) GND(0,3.6) GND(0.6,-9.45) GND(0.6,9.45) GND(0.7,-7.2) GND(1.54,-5.4) GND(1.54,-1.8) GND(1.54,0) GND(1.54,1.8) GND(1.54,3.6) GND(1.8,-9.45) GND(1.8,9.45) GND(3,-9.45) GND(3,9.45) GND(4.2,-9.45) GND(4.2,9.45) GND(5.7,-10.225) GND(5.7,-9.025) GND(5.7,-7.825) GND(5.7,-6.625) TP1(-5.7,-2.5) TP2(5.7,-2.5) TP3(-5.7,0.04) TP4(5.7,0.04) TP5(-5.7,2.58) TP6(5.7,2.58) TP7(-5.7,5.12) TP8(5.7,5.12) TP9(-5.7,7.66) TP10(5.7,7.66) TP11(-5.7,10.2) TP12(5.7,10.2)
Top Layer:
  circle w0.45: c-6.85,10.2 r0.225
  circle w0.45: c-6.85,9 r0.225
  circle w0.45: c-6.85,7.8 r0.225
  circle w0.45: c-6.85,6.6 r0.225
  circle w0.45: c-6.85,5.4 r0.225
  circle w0.45: c-6.85,4.2 r0.225
  circle w0.45: c-6.85,3 r0.225
  circle w0.45: c-6.85,1.8 r0.225
  circle w0.45: c-6.85,0.6 r0.225
  circle w0.45: c-6.85,-0.6 r0.225
  circle w0.45: c-6.85,-1.8 r0.225
  circle w0.45: c-6.85,-3 r0.225
  circle w0.45: c-6.85,-4.2 r0.225
  circle w0.45: c-6.85,-5.4 r0.225
  circle w0.45: c-6.85,-6.6 r0.225
  circle w0.45: c-6.85,-7.8 r0.225
  circle w0.45: c-6.85,-9 r0.225
  circle w0.45: c-6.85,-10.2 r0.225
  circle w0.45: c-4.2,-10.6 r0.225
  circle w0.45: c-3,-10.6 r0.225
  circle w0.45: c-1.8,-10.6 r0.225
  circle w0.45: c-0.6,-10.6 r0.225
  circle w0.45: c0.6,-10.6 r0.225
  circle w0.45: c1.8,-10.6 r0.225
  circle w0.45: c3,-10.6 r0.225
  circle w0.45: c4.2,-10.6 r0.225
  circle w0.45: c6.875,-10.2 r0.225
  circle w0.45: c6.875,-9 r0.225
  circle w0.45: c6.875,-7.8 r0.225
  circle w0.45: c6.875,-6.6 r0.225
  circle w0.45: c6.875,-5.4 r0.225
  circle w0.45: c6.875,-4.2 r0.225
  circle w0.45: c6.875,-3 r0.225
  circle w0.45: c6.875,-0.6 r0.225
  circle w0.45: c6.875,0.6 r0.225
  circle w0.45: c6.875,1.8 r0.225
  circle w0.45: c6.875,3 r0.225
  circle w0.45: c6.875,10.2 r0.225
  circle w0.45: c6.875,9 r0.225
  circle w0.45: c6.875,7.8 r0.225
  circle w0.45: c4.2,10.625 r0.225
  circle w0.45: c3,10.625 r0.225
  circle w0.45: c1.8,10.625 r0.225
  circle w0.45: c0.6,10.625 r0.225
  circle w0.45: c-0.6,10.625 r0.225
  circle w0.45: c-1.8,10.625 r0.225
  circle w0.45: c-3,10.625 r0.225
  circle w0.45: c-4.2,10.625 r0.225
  circle w0.45: c6.875,4.2 r0.225
  circle w0.45: c6.875,5.4 r0.225
  circle w0.45: c6.875,6.6 r0.225
  circle w0.45: c6.875,-1.8 r0.225
Top Overlay:
  lines w0.15: -7.4,-10.85 -7.4,-11.15 -4.85,-11.15 ; -7.4,10.85 -7.4,11.15 -4.85,11.15 ; 4.85,-11.15 7.4,-11.15 7.4,-10.85 ; 4.85,11.15 7.4,11.15 7.4,10.85
  lines w0.2: -8.13,10.246 ccw(c-8.2,10.225) -8.127,10.218
Mechanical 15:
  lines w0.05: -7.925,-11.675 -7.925,11.675 7.925,11.675 7.925,-11.675 -7.925,-11.675
  lines w0.1: -0.5,0 0,0 0.5,0 ; 0,-0.5 0,0.5
  text ".Designator" at 0.1,0.433 h1
3D body "ODIN-W262 Module.stp": height 4.47, standoff -0.02, extent -7.4,-11.15 7.4,11.15

## PAM [mm] "u-blox PAM antenna module"
pads (10):
  oval 1.27x2.54 hole 0.9 paste-2539.97: 1(-9.036,-9.876) 2(-6.496,-9.876) 3(-3.956,-9.876) 4(-1.416,-9.876) 5(1.124,-9.876) 6(3.664,-9.876) 7(6.204,-9.876) 8(8.744,-9.876)
  rect 2.5x2.5 smd paste-1.25: ""(-11.306,6.374) ""(11.204,6.374)
Top Layer:
  lines w0.254: -11.041,10.989 -10.991,10.989 ; 10.939,10.939 10.939,10.989
Top Overlay:
  circle w0.254: c-9.05,-12.1 r0.1
  lines w0.16: -11.036,4.799 -11.036,-11.001 -10.411,-11.001 ; -11.036,7.949 -11.036,10.999 10.964,10.999 10.964,7.949 ; 7.964,9.074 7.964,9.774 ; 7.964,9.149 7.964,8.699 9.039,8.699 9.039,-6.576 8.689,-6.926 8.195,-7.42 -8.292,-7.42 -9.111,-6.601 -9.111,8.949 -8.286,9.774 7.964,9.774 ; 10.089,-11.001 10.964,-11.001 10.964,4.799 ; 7.964,9.774 7.964,9.774
Mechanical 13:
  text "Samtec-TLW-108-06-G-S" at -10.261,-8.351 h0.6
  text "PAM" at -10.736,10.074 h0.6
Mechanical 15:
  lines w0.1: -0.5,0 0,0 0.5,0 ; 0,-0.5 0,0.5 ; -13.051,-11.751 -13.051,11.749 12.949,11.749 12.949,-11.751 -13.051,-11.751
  text ".Designator" at 0.1,0.433 h1
3D body "PAM (STEP-AP214).STEP": height 7.66, standoff -0.04, extent -11.036,-11.001 10.964,10.999
3D body "Samtec-TLW-108-06-G-S (1).step": height 4.24, standoff -3.38, extent -10.311,-11.121 10.009,-8.632

## R41Z_LGA45S_1620X1060X210_PCB [mm] "LGA, 45pin, 1.1mm Pitch, 1.2mm x 10.6mm"
height 2.1
pads (45):
  rect 0.59x0.59 smd: 1(-4.725,3.275) 2(-3.725,2.6) 3(-4.725,1.925) 4(-3.725,1.25) 5(-4.725,0.575) 6(-3.725,-0.1) 7(-4.725,-0.775) 8(-3.725,-1.45) 9(-4.725,-2.125) 10(-3.725,-2.8) 11(-4.725,-3.475) 12(-3.725,-4.15) 13(-4.725,-4.825) 14(-3.725,-5.5) 15(-4.725,-6.175) 16(-4.725,-7.525) 17(-3.375,-7.525) 18(-2.7,-6.525) 19(-2.025,-7.525) 20(-1.35,-6.525) 21(-0.675,-7.525) 22(0,-6.525) 23(0.675,-7.525) 24(1.35,-6.525) 25(2.025,-7.525) 26(2.7,-6.525) 27(3.375,-7.525) 28(4.725,-7.525) 29(4.725,-6.175) 30(3.725,-5.5) 31(4.725,-4.825) 32(3.725,-4.15) 33(4.725,-3.475) 34(3.725,-2.8) 35(4.725,-2.125) 36(3.725,-1.45) 37(4.725,-0.775) 38(3.725,-0.1) 39(4.725,0.575) 40(3.725,1.25) 41(4.725,1.925) 42(3.75,2.6) 43(4.725,3.275) 44(1.35,3.275) 45(-1.35,3.275)
Top Overlay:
  circle w0.254: c-6,3.275 r0.1
  lines w0.127: -5.4,-8.2 -5.4,8.2 5.4,8.2 5.4,-8.2 -5.4,-8.2
Mechanical 13:
  lines w0.05: -5.3,-8.1 -5.3,8.1 5.3,8.1 5.3,-8.1 -5.3,-8.1
Mechanical 15:
  lines w0.05: -5.6,-8.4 -5.6,8.4 5.6,8.4 5.6,-8.4 -5.6,-8.4
  lines w0.1: -0.5,0 0,0 0.5,0 ; 0,-0.5 0,0.5
  text ".Designator" at 0.1,0.433 h1
Multi-Layer:
  pour cut-out: -5.3,3.575 5.3,3.575 5.3,8.1 -5.3,8.1
3D body "R41Z.STEP": height 1.99, standoff 0.05, extent -5.3,-8.1 5.3,8.1

## SAM-M8 [mm] "ublox SAM antenna module"
pads (20):
  rect 1.8x1.5 smd paste-1.8: 1(-6.6,3.8) 2(-6.6,1.9) 3(-6.6,0) 4(-6.6,-1.9) 5(-6.6,-3.8) 11(6.6,-3.8) 12(6.6,-1.9) 13(6.6,0) 14(6.6,1.9) 15(6.6,3.8)
  rect 1.5x1.8 smd paste-1.8: 6(-3.8,-6.6) 7(-1.9,-6.6) 8(0,-6.6) 9(1.9,-6.6) 10(3.8,-6.6) 16(3.8,6.6) 17(1.9,6.6) 18(0,6.6) 19(-1.9,6.6) 20(-3.8,6.6)
Top Overlay:
  circle w0.254: c-8.975,3.825 r0.127
  lines w0.15: -7.751,-7.775 -7.751,-0.024 -7.751,7.741 7.741,7.741 7.741,-0.009 7.741,-7.774 -0.001,-7.774 -7.75,-7.774
Top Paste:
  region: 7.471,3.665 6.752,3.665 6.752,3.085 7.471,3.085
  region: 7.467,4.502 6.748,4.502 6.748,3.922 7.467,3.922
  region: 6.453,3.669 5.734,3.669 5.734,3.089 6.453,3.089
  region: 6.453,4.499 5.734,4.499 5.734,3.919 6.453,3.919
  region: 7.467,1.769 6.748,1.769 6.748,1.189 7.467,1.189
  region: 7.463,2.606 6.744,2.606 6.744,2.026 7.463,2.026
  region: 6.449,1.773 5.73,1.773 5.73,1.193 6.449,1.193
  region: 6.449,2.603 5.73,2.603 5.73,2.023 6.449,2.023
  region: 7.467,-2.037 6.748,-2.037 6.748,-2.617 7.467,-2.617
  region: 7.463,-1.2 6.744,-1.2 6.744,-1.78 7.463,-1.78
  region: 6.449,-2.033 5.73,-2.033 5.73,-2.613 6.449,-2.613
  region: 6.449,-1.203 5.73,-1.203 5.73,-1.783 6.449,-1.783
  region: -5.731,-3.933 -6.45,-3.933 -6.45,-4.513 -5.731,-4.513
  region: -5.735,-3.096 -6.454,-3.096 -6.454,-3.676 -5.735,-3.676
  region: -6.749,-3.929 -7.468,-3.929 -7.468,-4.509 -6.749,-4.509
  region: -6.749,-3.099 -7.468,-3.099 -7.468,-3.679 -6.749,-3.679
  region: -5.731,-2.037 -6.45,-2.037 -6.45,-2.617 -5.731,-2.617
  region: -5.735,-1.2 -6.454,-1.2 -6.454,-1.78 -5.735,-1.78
  region: -6.749,-2.033 -7.468,-2.033 -7.468,-2.613 -6.749,-2.613
  region: -6.749,-1.203 -7.468,-1.203 -7.468,-1.783 -6.749,-1.783
  region: -5.731,1.769 -6.45,1.769 -6.45,1.189 -5.731,1.189
  region: -5.735,2.606 -6.454,2.606 -6.454,2.026 -5.735,2.026
  region: -6.749,1.773 -7.468,1.773 -7.468,1.193 -6.749,1.193
  region: -6.749,2.603 -7.468,2.603 -7.468,2.023 -6.749,2.023
  region: -6.749,4.508 -7.468,4.508 -7.468,3.928 -6.749,3.928
  region: -6.749,3.678 -7.468,3.678 -7.468,3.098 -6.749,3.098
  region: -5.735,4.511 -6.454,4.511 -6.454,3.931 -5.735,3.931
  region: -5.731,3.674 -6.45,3.674 -6.45,3.094 -5.731,3.094
  region: 2.594,6.746 2.594,7.465 2.014,7.465 2.014,6.746
  region: 1.764,6.746 1.764,7.465 1.184,7.465 1.184,6.746
  region: 2.597,5.732 2.597,6.451 2.017,6.451 2.017,5.732
  region: 1.76,5.728 1.76,6.447 1.18,6.447 1.18,5.728
  region: -1.193,6.741 -1.193,7.46 -1.773,7.46 -1.773,6.741
  region: -2.023,6.741 -2.023,7.46 -2.603,7.46 -2.603,6.741
  region: -1.19,5.727 -1.19,6.446 -1.77,6.446 -1.77,5.727
  region: -2.027,5.723 -2.027,6.442 -2.607,6.442 -2.607,5.723
  region: -0.126,-7.473 -0.126,-6.754 -0.706,-6.754 -0.706,-7.473
  region: 0.711,-7.469 0.711,-6.75 0.131,-6.75 0.131,-7.469
  region: -0.122,-6.455 -0.122,-5.736 -0.702,-5.736 -0.702,-6.455
  region: 0.708,-6.455 0.708,-5.736 0.128,-5.736 0.128,-6.455
  region: -2.032,-7.466 -2.032,-6.747 -2.612,-6.747 -2.612,-7.466
  region: -1.195,-7.462 -1.195,-6.743 -1.775,-6.743 -1.775,-7.462
  region: -2.028,-6.448 -2.028,-5.729 -2.608,-5.729 -2.608,-6.448
  region: -1.198,-6.448 -1.198,-5.729 -1.778,-5.729 -1.778,-6.448
  region: -3.098,-6.455 -3.098,-5.736 -3.678,-5.736 -3.678,-6.455
  region: -3.928,-6.455 -3.928,-5.736 -4.508,-5.736 -4.508,-6.455
  region: -3.095,-7.469 -3.095,-6.75 -3.675,-6.75 -3.675,-7.469
  region: -3.932,-7.473 -3.932,-6.754 -4.512,-6.754 -4.512,-7.473
  region: 2.604,-6.446 2.604,-5.727 2.024,-5.727 2.024,-6.446
  region: 1.774,-6.446 1.774,-5.727 1.194,-5.727 1.194,-6.446
  region: 2.607,-7.46 2.607,-6.741 2.027,-6.741 2.027,-7.46
  region: 1.77,-7.464 1.77,-6.745 1.19,-6.745 1.19,-7.464
  region: 3.666,-7.473 3.666,-6.754 3.086,-6.754 3.086,-7.473
  region: 4.503,-7.469 4.503,-6.75 3.923,-6.75 3.923,-7.469
  region: 3.67,-6.455 3.67,-5.736 3.09,-5.736 3.09,-6.455
  region: 4.5,-6.455 4.5,-5.736 3.92,-5.736 3.92,-6.455
  region: -3.937,5.732 -3.937,6.451 -4.517,6.451 -4.517,5.732
  region: -3.1,5.736 -3.1,6.455 -3.68,6.455 -3.68,5.736
  region: -3.933,6.75 -3.933,7.469 -4.513,7.469 -4.513,6.75
  region: -3.103,6.75 -3.103,7.469 -3.683,7.469 -3.683,6.75
  region: -0.131,5.732 -0.131,6.451 -0.711,6.451 -0.711,5.732
  region: 0.706,5.736 0.706,6.455 0.126,6.455 0.126,5.736
  region: -0.127,6.75 -0.127,7.469 -0.707,7.469 -0.707,6.75
  region: 0.703,6.75 0.703,7.469 0.123,7.469 0.123,6.75
  region: 3.665,5.732 3.665,6.451 3.085,6.451 3.085,5.732
  region: 4.502,5.736 4.502,6.455 3.922,6.455 3.922,5.736
  region: 3.669,6.75 3.669,7.469 3.089,7.469 3.089,6.75
  region: 4.499,6.75 4.499,7.469 3.919,7.469 3.919,6.75
  region: -6.749,0.698 -7.468,0.698 -7.468,0.118 -6.749,0.118
  region: -6.749,-0.132 -7.468,-0.132 -7.468,-0.712 -6.749,-0.712
  region: -5.735,0.701 -6.454,0.701 -6.454,0.121 -5.735,0.121
  region: -5.731,-0.136 -6.45,-0.136 -6.45,-0.716 -5.731,-0.716
  region: 6.449,-3.099 5.73,-3.099 5.73,-3.679 6.449,-3.679
  region: 6.449,-3.929 5.73,-3.929 5.73,-4.509 6.449,-4.509
  region: 7.463,-3.096 6.744,-3.096 6.744,-3.676 7.463,-3.676
  region: 7.467,-3.933 6.748,-3.933 6.748,-4.513 7.467,-4.513
  region: 6.449,0.698 5.73,0.698 5.73,0.118 6.449,0.118
  region: 6.449,-0.132 5.73,-0.132 5.73,-0.712 6.449,-0.712
  region: 7.463,0.701 6.744,0.701 6.744,0.121 7.463,0.121
  region: 7.467,-0.136 6.748,-0.136 6.748,-0.716 7.467,-0.716
Mechanical 13:
  lines w0.1: -7.751,-7.774 -7.751,7.741 7.74,7.741 7.74,-7.774 -7.751,-7.774
Mechanical 15:
  lines w0.1: -0.5,0 0,0 0.5,0 ; 0,-0.5 0,0.5 ; -8.5,-8.5 8.5,-8.5 8.5,8.5 -8.5,8.5 -8.5,-8.5
  text ".Designator" at 0.1,0.433 h1
3D body: height 6.8, standoff 0, extent -7.751,-7.775 7.741,7.741

## SARA [mm] "GSM/GPRS and GSM/EGPRS/HSPA Cellular Module"
height 3.25
pads (96):
  rect 1.5x0.8 smd paste-2539.97: 1(-6.95,11) 2(-6.95,9.9) 3(-6.95,8.8) 4(-6.95,7.7) 5(-6.95,6.6) 6(-6.95,5.5) 7(-6.95,4.4) 8(-6.95,3.3) 9(-6.95,2.2) 10(-6.95,1.1) 11(-6.95,0) 12(-6.95,-1.1) 13(-6.95,-2.2) 14(-6.95,-3.3) 15(-6.95,-4.4) 16(-6.95,-5.5) 17(-6.95,-6.6) 18(-6.95,-7.7) 19(-6.95,-8.8) 20(-6.95,-9.9) 21(-6.95,-11) 33(6.95,-11) 34(6.95,-9.9) 35(6.95,-8.8) 36(6.95,-7.7) 37(6.95,-6.6) 38(6.95,-5.5) 39(6.95,-4.4) 40(6.95,-3.3) 41(6.95,-2.2) 42(6.95,-1.1) 43(6.95,0) 44(6.95,1.1) 45(6.95,2.2) 46(6.95,3.3) 47(6.95,4.4) 48(6.95,5.5) 49(6.95,6.6) 50(6.95,7.7) 51(6.95,8.8) 52(6.95,9.9) 53(6.95,11)
  rect 0.8x1.5 smd paste-2539.97: 22(-5.5,-11.95) 23(-4.4,-11.95) 24(-3.3,-11.95) 25(-2.2,-11.95) 26(-1.1,-11.95) 27(0,-11.95) 28(1.1,-11.95) 29(2.2,-11.95) 30(3.3,-11.95) 31(4.4,-11.95) 32(5.5,-11.95) 54(5.5,11.95) 55(4.4,11.95) 56(3.3,11.95) 57(2.2,11.95) 58(1.1,11.95) 59(0,11.95) 60(-1.1,11.95) 61(-2.2,11.95) 62(-3.3,11.95) 63(-4.4,11.95) 64(-5.5,11.95)
  rect 1.1x1.1 smd paste-0.025: 65(-5.25,10.25) 66(-3.15,10.25) 67(-1.05,10.25) 68(1.05,10.25) 69(3.15,10.25) 70(5.25,10.25) 71(-5.25,8.45) 72(-3.15,8.45) 73(-1.05,8.45) 74(1.05,8.45) 75(3.15,8.45) 76(5.25,8.45) 77(-5.25,6.65) 78(5.25,6.65) 79(-5.25,3.05) 80(5.25,3.05) 81(-5.25,-3.05) 82(5.25,-3.05) 83(-5.25,-6.65) 84(5.25,-6.65) 85(-5.25,-8.45) 86(-3.15,-8.45) 87(-1.05,-8.45) 88(1.05,-8.45) 89(3.15,-8.45) 90(5.25,-8.45) 91(-5.25,-10.25) 92(-3.15,-10.25) 93(-1.05,-10.25) 94(1.05,-10.25) 95(3.15,-10.25) 96(5.25,-10.25)
Top Overlay:
  circle w0.4: c-8.4,11 r0.05
  lines w0.15: -8,-13 8,-13 8,13 -8,13 -8,-13
Top Paste:
  drawing of 64 lines, arcs and shapes, not listed
Mechanical 15:
  lines w0.05: -9,-14 9,-14 9,14 -9,14 -9,-14
  lines w0.1: -0.5,0 0,0 0.5,0 ; 0,-0.5 0,0.5
  text ".Designator" at 0.1,0.433 h1
3D body "SARA.STEP": height 0.13, standoff -2.87, extent -8,-13.05 8,12.95
3D body: height 3.25, standoff 0, extent -8,-13 8,13

## THEO-P173-01A [mm] "Host-based V2X transceiver module"
height 3.5
pads (69):
  rrect50% 1.7x0.87 smd: 1(-14.65,16) 2(-14.65,14) 3(-14.65,12) 4(-14.65,10) 5(-14.65,8) 6(-14.65,6) 7(-14.65,4) 8(-14.65,2) 9(-14.65,0) 10(-14.65,-2) 11(-14.65,-4) 12(-14.65,-6) 13(-14.65,-8) 14(-14.65,-10) 15(-14.65,-12) 16(-14.65,-14) 17(-14.65,-16) 32(14.65,-16) 33(14.65,-14) 34(14.65,-12) 35(14.65,-10) 36(14.65,-8) 37(14.65,-6) 38(14.65,-4) 39(14.65,-2) 40(14.65,0) 41(14.65,2) 42(14.65,4) 43(14.65,6) 44(14.65,8) 45(14.65,10) 46(14.65,12) 47(14.65,14) 48(14.65,16)
  rrect50% 0.87x1.7 smd: 18(-13,-19.65) 20(-9,-19.65) 22(-5,-19.65) 24(-1,-19.65) 25(1,-19.65) 27(5,-19.65) 29(9,-19.65) 31(13,-19.65) 49(13,19.65) 50(11,19.65) 51(9,19.65) 52(7,19.65) 53(5,19.65) 54(3,19.65) 55(1,19.65) 56(-1,19.65) 57(-3,19.65) 58(-5,19.65) 59(-7,19.65) 60(-9,19.65) 61(-11,19.65) 62(-13,19.65)
  rrect50% 0.76x1.1 smd: 19(-11,-19.95) 21(-7,-19.95) 23(-3,-19.95) 26(3,-19.95) 28(7,-19.95) 30(11,-19.95)
  round 0.76 smd: 19(-11,-19.6) 21(-7,-19.6) 23(-3,-19.6) 26(3,-19.6) 28(7,-19.6) 30(11,-19.6)
  rect 1x1 smd paste-1: GND_TAB(0,0)
Top Layer:
  region: -13,18 13,18 13,-17.8 -1,-17.8 -1,10.5 -3,10.5 -3,14.5 -5,14.5 -5,16.5 -7,16.5 -7,12.5 -5,12.5 -5,10.5 -7,10.5 -7,8.5 -1,8.5 -1,-17.8 -13,-17.8
Top Overlay:
  circle w0.635: c-16.754,16 r0.254
  lines w0.15: -15,-17 -15,-20 -14,-20 ; -15,17 -15,20 -14,20 ; 14,-20 15,-20 15,-17 ; 14,20 15,20 15,17
Top Paste:
  rectangle: -0.5,-8.3 0.5,-6.3
  rectangle: -0.5,-11.3 0.5,-9.3
  rectangle: -0.5,-17.3 0.5,-15.3
  rectangle: -0.5,-14.3 0.5,-12.3
  rectangle: -0.5,3.5 0.5,5.5
  rectangle: -0.5,0.5 0.5,2.5
  rectangle: -0.5,-5.3 0.5,-3.3
  rectangle: -0.5,-2.3 0.5,-0.3
  rectangle: -0.5,9.5 0.5,11.5
  rectangle: -0.5,6.5 0.5,8.5
  rectangle: -0.5,12.5 0.5,14.5
  rectangle: -0.5,15.5 0.5,17.5
  rectangle: 1.5,-2.3 3.5,-0.3
  rectangle: 4.5,-2.3 6.5,-0.3
  rectangle: 4.5,-5.3 6.5,-3.3
  rectangle: 1.5,-5.3 3.5,-3.3
  rectangle: 4.5,-8.3 6.5,-6.3
  rectangle: 1.5,-8.3 3.5,-6.3
  rectangle: 1.5,-17.3 3.5,-15.3
  rectangle: 4.5,-17.3 6.5,-15.3
  rectangle: 1.5,-14.3 3.5,-12.3
  rectangle: 4.5,-14.3 6.5,-12.3
  rectangle: 4.5,-11.3 6.5,-9.3
  rectangle: 1.5,-11.3 3.5,-9.3
  rectangle: 1.5,6.5 3.5,8.5
  rectangle: 4.5,6.5 6.5,8.5
  rectangle: 4.5,3.5 6.5,5.5
  rectangle: 1.5,3.5 3.5,5.5
  rectangle: 4.5,0.5 6.5,2.5
  rectangle: 1.5,0.5 3.5,2.5
  rectangle: 1.5,9.5 3.5,11.5
  rectangle: 4.5,9.5 6.5,11.5
  rectangle: 1.5,12.5 3.5,14.5
  rectangle: 4.5,12.5 6.5,14.5
  rectangle: 4.5,15.5 6.5,17.5
  rectangle: 1.5,15.5 3.5,17.5
  rectangle: 7.5,-2.3 9.5,-0.3
  rectangle: 10.5,-2.3 12.5,-0.3
  rectangle: 10.5,-5.3 12.5,-3.3
  rectangle: 7.5,-5.3 9.5,-3.3
  rectangle: 10.5,-8.3 12.5,-6.3
  rectangle: 7.5,-8.3 9.5,-6.3
  rectangle: 7.5,-17.3 9.5,-15.3
  rectangle: 10.5,-17.3 12.5,-15.3
  rectangle: 7.5,-14.3 9.5,-12.3
  rectangle: 10.5,-14.3 12.5,-12.3
  rectangle: 10.5,-11.3 12.5,-9.3
  rectangle: 7.5,-11.3 9.5,-9.3
  rectangle: 7.5,6.5 9.5,8.5
  rectangle: 10.5,6.5 12.5,8.5
  rectangle: 10.5,3.5 12.5,5.5
  rectangle: 7.5,3.5 9.5,5.5
  rectangle: 10.5,0.5 12.5,2.5
  rectangle: 7.5,0.5 9.5,2.5
  rectangle: 7.5,9.5 9.5,11.5
  rectangle: 10.5,9.5 12.5,11.5
  rectangle: 7.5,12.5 9.5,14.5
  rectangle: 10.5,12.5 12.5,14.5
  rectangle: 10.5,15.5 12.5,17.5
  rectangle: 7.5,15.5 9.5,17.5
  rectangle: -2.5,11 -1.5,11.5
  rectangle: -12.5,-2.3 -10.5,-0.3
  rectangle: -9.5,-2.3 -7.5,-0.3
  rectangle: -9.5,-5.3 -7.5,-3.3
  rectangle: -12.5,-5.3 -10.5,-3.3
  rectangle: -9.5,-8.3 -7.5,-6.3
  rectangle: -12.5,-8.3 -10.5,-6.3
  rectangle: -12.5,-17.3 -10.5,-15.3
  rectangle: -9.5,-17.3 -7.5,-15.3
  rectangle: -12.5,-14.3 -10.5,-12.3
  rectangle: -9.5,-14.3 -7.5,-12.3
  rectangle: -9.5,-11.3 -7.5,-9.3
  rectangle: -12.5,-11.3 -10.5,-9.3
  rectangle: -12.5,6.5 -10.5,8.5
  rectangle: -9.5,6.5 -7.5,8.5
  rectangle: -9.5,3.5 -7.5,5.5
  rectangle: -12.5,3.5 -10.5,5.5
  rectangle: -9.5,0.5 -7.5,2.5
  rectangle: -12.5,0.5 -10.5,2.5
  rectangle: -12.5,9.5 -10.5,11.5
  rectangle: -9.5,9.5 -7.5,11.5
  rectangle: -12.5,12.5 -10.5,14.5
  rectangle: -9.5,12.5 -7.5,14.5
  rectangle: -9.5,15.5 -7.5,17.5
  rectangle: -12.5,15.5 -10.5,17.5
  rectangle: -6.5,17 -4.5,17.5
  rectangle: -3.5,15.5 -1.5,17.5
  rectangle: -2.5,12.5 -1.5,14.5
  rectangle: -6.5,11 -5.5,11.5
  rectangle: -6.5,0.5 -4.5,2.5
  rectangle: -3.5,0.5 -1.5,2.5
  rectangle: -6.5,3.5 -4.5,5.5
  rectangle: -3.5,3.5 -1.5,5.5
  rectangle: -3.5,6.5 -1.5,8
  rectangle: -6.5,6.5 -4.5,8
  rectangle: -6.5,-11.3 -4.5,-9.3
  rectangle: -3.5,-11.3 -1.5,-9.3
  rectangle: -3.5,-14.3 -1.5,-12.3
  rectangle: -6.5,-14.3 -4.5,-12.3
  rectangle: -3.5,-17.3 -1.5,-15.3
  rectangle: -6.5,-17.3 -4.5,-15.3
  rectangle: -6.5,-8.3 -4.5,-6.3
  rectangle: -3.5,-8.3 -1.5,-6.3
  rectangle: -6.5,-5.3 -4.5,-3.3
  rectangle: -3.5,-5.3 -1.5,-3.3
  rectangle: -3.5,-2.3 -1.5,-0.3
  rectangle: -6.5,-2.3 -4.5,-0.3
Top Solder:
  region: -13.1,18.1 13.1,18.1 13.1,-17.9 -0.8,-17.9 -0.8,10.7 -2.8,10.7 -2.8,14.7 -4.8,14.7 -4.8,16.7 -7.2,16.7 -7.2,12.3 -5.2,12.3 -5.2,10.7 -7.2,10.7 -7.2,8.3 -0.8,8.3 -0.8,-17.9 -13.1,-17.9
Mechanical 13:
  circle w0.025: c0,0 r0.762
  circle w0.025: c-6,15.5 r0.8
  circle w0.025: c-6,13.5 r0.8
  circle w0.025: c-4,11.5 r0.8
  circle w0.025: c-6,9.5 r0.8
  circle w0.025: c-1.95,9.55 r0.8
  circle w0.025: c-4,9.5 r0.8
  circle w0.025: c-4,13.5 r0.8
  lines w0.025: -6.3,9.5 -5.7,9.5 ; -6.3,13.5 -5.7,13.5 ; -6.3,15.5 -5.7,15.5 ; -6,9.2 -6,9.8 ; -6,13.2 -6,13.8 ; -6,15.2 -6,15.8 ; -4.3,9.5 -3.7,9.5 ; -4.3,11.5 -3.7,11.5 ; -4.3,13.5 -3.7,13.5 ; -4,9.2 -4,9.8 ; -4,11.2 -4,11.8 ; -4,13.2 -4,13.8 ; -2.25,9.55 -1.65,9.55 ; -1.95,9.25 -1.95,9.85 ; -0.762,0 0.762,0 ; 0,-0.762 0,0.762
  lines w0.1: -15,-20 15,-20 15,20 -15,20 -15,-20
Mechanical 15:
  lines w0.05: -16.5,-21.5 16.5,-21.5 16.5,21.5 -16.5,21.5 -16.5,-21.5
  lines w0.1: -0.5,0 0,0 0.5,0 ; 0,-0.5 0,0.5
  text ".Designator" at 0.1,0.433 h1
3D body: height 3.6, standoff 0, extent -15,-20 15,20

## TOBY [mm] "TOBY cellular module"
pads (152):
  rect 1.5x0.8 smd paste+0 mask+0.05: 1(-10.938,15.4) 29(-10.938,-15.4) 47(10.938,-15.4) 75(10.937,15.4)
  rect 1.8x0.8 smd paste-0.025 mask+0.05: 2(-11.087,14.3) 3(-11.087,13.2) 4(-11.087,12.1) 5(-11.087,11) 6(-11.087,9.9) 7(-11.087,8.8) 8(-11.087,7.7) 9(-11.087,6.6) 10(-11.087,5.5) 11(-11.087,4.4) 12(-11.087,3.3) 13(-11.087,2.2) 14(-11.087,1.1) 15(-11.087,0) 16(-11.087,-1.1) 17(-11.087,-2.2) 18(-11.087,-3.3) 19(-11.087,-4.4) 20(-11.087,-5.5) 21(-11.087,-6.6) 22(-11.087,-7.7) 23(-11.087,-8.8) 24(-11.087,-9.9) 25(-11.087,-11) 26(-11.087,-12.1) 27(-11.087,-13.2) 28(-11.087,-14.3) 48(11.088,-14.3) 49(11.088,-13.2) 50(11.088,-12.1) 51(11.088,-11) 52(11.088,-9.9) 53(11.088,-8.8) 54(11.088,-7.7) 55(11.088,-6.6) 56(11.088,-5.5) 57(11.088,-4.4) 58(11.088,-3.3) 59(11.088,-2.2) 60(11.088,-1.1) 61(11.088,0) 62(11.088,1.1) 63(11.088,2.2) 64(11.088,3.3) 65(11.088,4.4) 66(11.088,5.5) 67(11.088,6.6) 68(11.088,7.7) 69(11.088,8.8) 70(11.088,9.9) 71(11.088,11) 72(11.088,12.1) 73(11.088,13.2) 74(11.088,14.3)
  rect 1.5x0.8 smd paste+0.025 mask+0.05: 30(-10.138,-16.7) 32(-6.938,-16.7) 44(6.962,-16.7) 46(10.163,-16.7) 76(10.137,16.7) 78(6.962,16.7) 90(-6.938,16.7) 92(-10.138,16.7)
  rect 1.1x1.1 smd paste+0.025 mask+0.05: 31(-8.538,-16.55) 45(8.563,-16.55) 77(8.537,16.55) 91(-8.537,16.55)
  rect 0.8x1.8 smd paste-0.025 mask+0.05: 33(-5.488,-16.5) 34(-4.388,-16.5) 35(-3.288,-16.5) 36(-2.188,-16.5) 37(-1.088,-16.5) 38(0.012,-16.5) 39(1.112,-16.5) 40(2.212,-16.5) 41(3.312,-16.5) 42(4.412,-16.5) 43(5.512,-16.5) 79(5.513,16.5) 81(3.313,16.5) 83(1.112,16.5) 84(0.012,16.5) 85(-1.088,16.5) 87(-3.287,16.5) 89(-5.487,16.5)
  rect 0.9x1.8 smd paste-0.025 mask+0.05: 80(4.413,16.5) 82(2.213,16.5) 86(-2.187,16.5) 88(-4.387,16.5)
  rect 0.8x1.5 smd paste+0.025 mask+0.05: 93(-8.537,14.95) 100(8.537,14.95) 145(-8.538,-14.95) 152(8.563,-14.95)
  rect 1.1x1.1 smd paste-0.025 mask+0.05: 94(-5.238,14.65) 95(-3.137,14.65) 96(-1.038,14.65) 97(1.062,14.65) 98(3.162,14.65) 99(5.262,14.65) 101(-5.238,12.85) 102(-3.137,12.85) 103(-1.038,12.85) 104(1.062,12.85) 105(3.162,12.85) 106(5.262,12.85) 107(-5.238,11.05) 108(5.262,11.05) 109(-5.238,5.85) 110(-3.137,5.85) 111(-1.038,5.85) 112(1.062,5.85) 113(3.162,5.85) 114(5.262,5.85) 115(-5.238,4.05) 116(-3.137,4.05) 117(-1.038,4.05) 118(1.062,4.05) 119(3.162,4.05) 120(5.262,4.05) 121(-5.238,2.25) 122(5.262,2.25) 123(-5.238,-2.25) 124(5.262,-2.25) 125(-5.238,-4.05) 126(-3.137,-4.05) 127(-1.038,-4.05) 128(1.062,-4.05) 129(3.162,-4.05) 130(5.262,-4.05) 131(-5.238,-5.85) 132(-3.137,-5.85) 133(-1.038,-5.85) 134(1.062,-5.85) 135(3.162,-5.85) 136(5.262,-5.85) 137(-5.238,-11.05) 138(5.262,-11.05) 139(-5.238,-12.85) 140(-3.137,-12.85) 141(-1.038,-12.85) 142(1.062,-12.85) 143(3.162,-12.85) 144(5.262,-12.85) 146(-5.238,-14.65) 147(-3.137,-14.65) 148(-1.038,-14.65) 149(1.062,-14.65) 150(3.162,-14.65) 151(5.262,-14.65)
Top Overlay:
  circle w0.4: c-12.85,15.4 r0.05
  lines w0.16: -12.39,-17.889 -12.39,17.899 12.394,17.899 12.413,17.88 12.413,-17.889 12.4,-17.902 -12.377,-17.902 -12.39,-17.889
Mechanical 15:
  lines w0.1: -0.5,0 0,0 0.5,0 ; 0,-0.5 0,0.5
  text ".Designator" at 0.1,0.433 h1
3D body "TOBY.STEP": height 2.6, standoff 0, extent -12.387,-17.9 12.413,17.9